# Altium footprint library 1932588.PcbLib: 1 footprints
Each footprint in its own frame and in the unit in brackets; x right, y up, seen from the top. Pads: shape width x height; smd on the part's side, far side on the other; paste and mask are expansions set on the pad; w line width, h text height; cw(c..) or ccw(c..) is an arc to the next point about the centre after c.
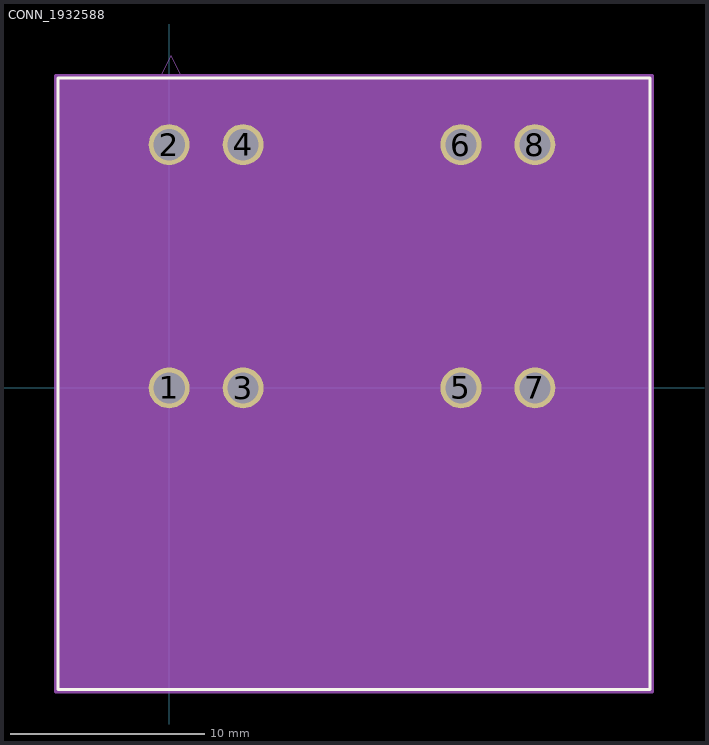
[diagram p0: the footprint, top view; thin cyan lines are the x and y axes]

## CONN_1932588 [mil]
pads (8):
  round 83 / inner round 60 / far side round 83 hole 63 paste-41.5 mask+0: 1(0,0) 2(0,492.13) 3(149.61,0) 4(149.61,492.13) 5(590.55,0) 6(590.55,492.13) 7(740.16,0) 8(740.16,492.13)
Top Overlay:
  lines w6: -225.48,-610.95 973.52,-610.95 973.52,627.05 -225.48,627.05 -225.48,-610.95
Mechanical 13:
  lines w1: -21.06,622.05 3.94,672.05 28.94,622.05 ; -220.48,-605.95 968.52,-605.95 968.52,622.05 -220.48,622.05 -220.48,-605.95
Mechanical 15:
  region: 978.52,632.05 978.52,-615.95 -230.48,-615.95 -230.48,632.05
  lines w6: -230.48,-615.95 -230.48,632.05 978.52,632.05 978.52,-615.95 -230.48,-615.95